# Altium footprint library Crystal_Osilator$.PcbLib: 54 footprints (part 1 of 4)
Each footprint in its own frame and in the unit in brackets; x right, y up, seen from the top. Pads: shape width x height; smd on the part's side, far side on the other; paste and mask are expansions set on the pad; w line width, h text height; cw(c..) or ccw(c..) is an arc to the next point about the centre after c.
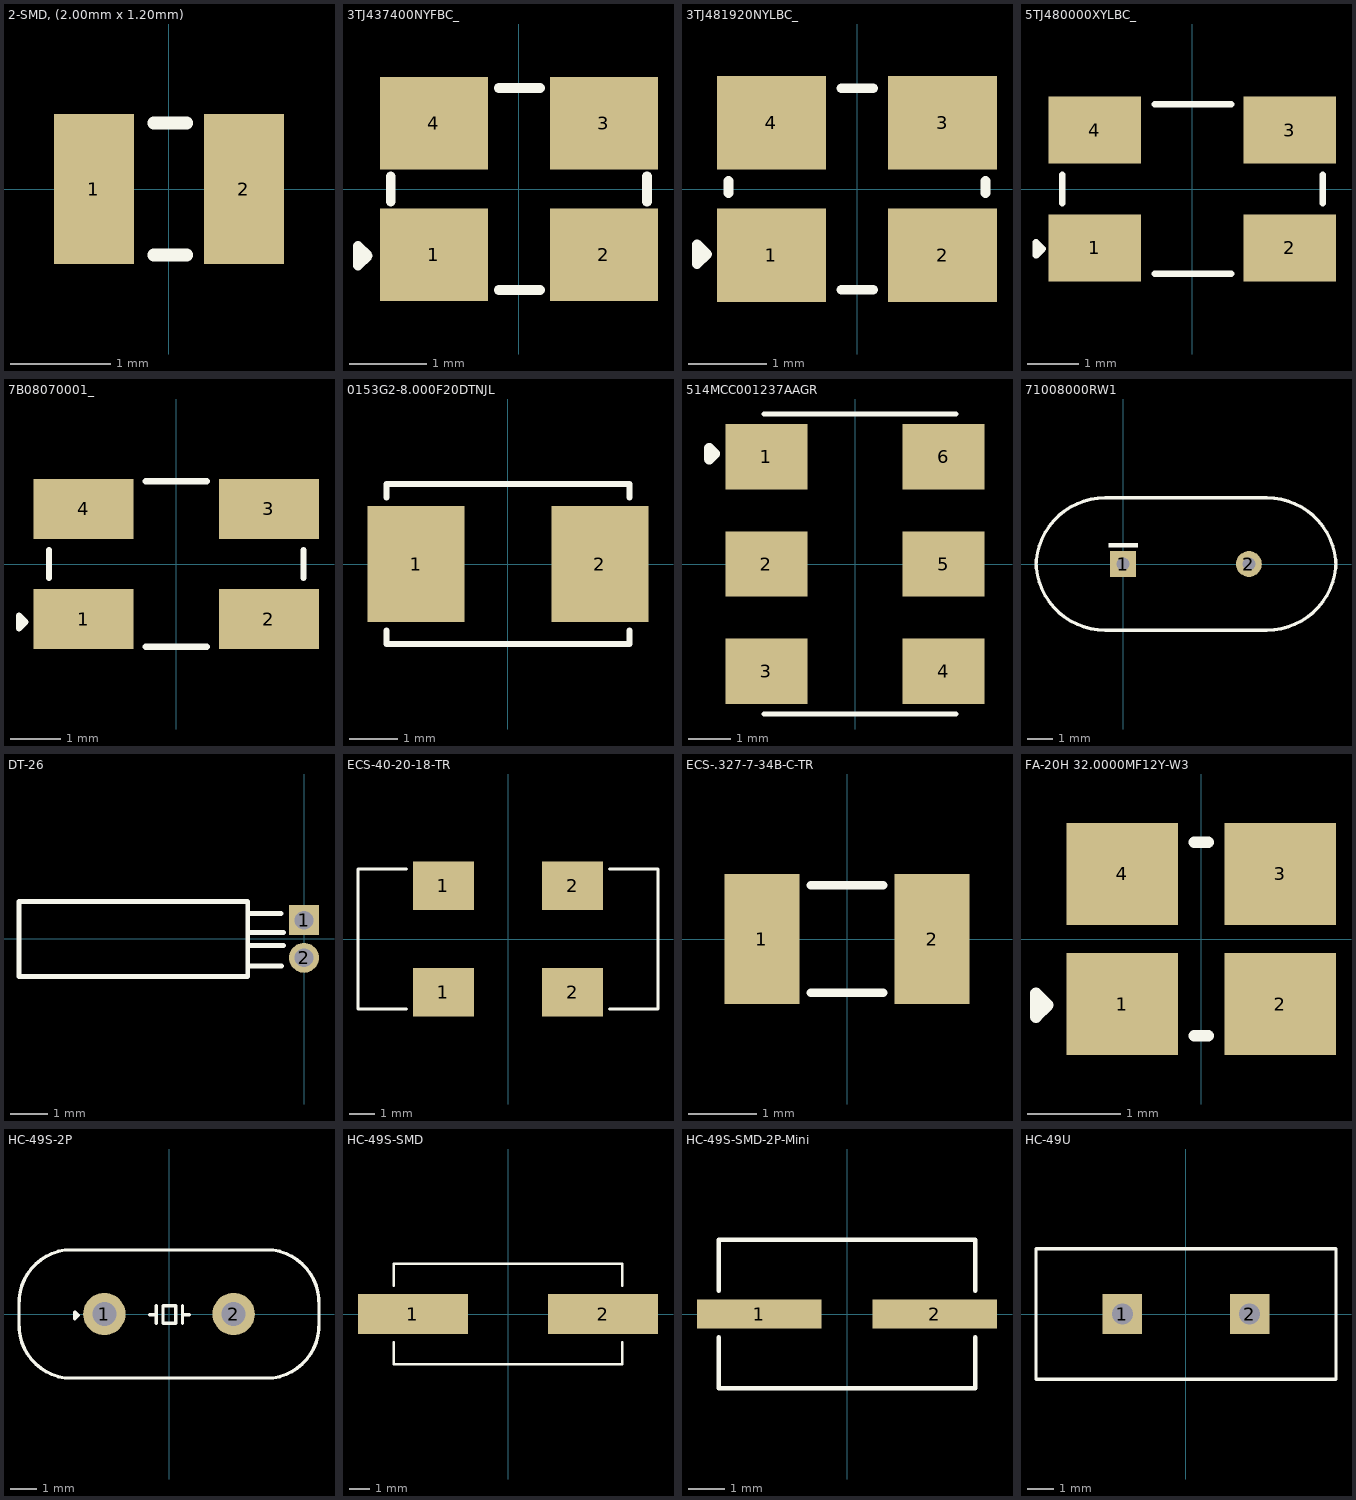
[diagram p0: the footprints below, top view; thin cyan lines are the x and y axes]

## 2-SMD, (2.00mm x 1.20mm) [mm]
pads (2):
  rect 0.8x1.5 smd: 1(-0.75,0) 2(0.75,0)
Top Overlay:
  lines w0.127: -0.152,-0.66 0.178,-0.66 ; -0.152,0.66 0.178,0.66
3D body "CM8V-T1A-32.768KHZ-6PF-20PPM-TA-QC.STEP": height 0.35, standoff 0, extent -1,-0.6 1,0.6

## 3TJ437400NYFBC_ [mm]
pads (4):
  rect 1.4x1.2 smd: 1(-1.1,-0.85) 2(1.1,-0.85) 3(1.1,0.85) 4(-1.1,0.85)
Top Overlay:
  lines w0.127: -1.659,-0.166 -1.659,0.164 ; -0.262,-1.307 0.272,-1.307 ; -0.262,1.307 0.272,1.307 ; 1.659,-0.166 1.659,0.164 ; -2.083,-0.991 -1.956,-0.864 -2.083,-0.737 -2.083,-0.991
3D body "User Library-Crystal_ECX-32.STEP": height 0.82, standoff 0, extent -1.6,-1.25 1.6,1.25

## 3TJ481920NYLBC_ [mm]
pads (4):
  rect 1.4x1.2 smd mask+0.07: 1(-1.1,-0.85) 2(1.1,-0.85) 3(1.1,0.85) 4(-1.1,0.85)
Top Overlay:
  lines w0.127: -1.651,-0.051 -1.651,0.102 ; -0.203,-1.295 0.203,-1.295 ; -0.203,1.295 0.203,1.295 ; 1.651,-0.051 1.651,0.102 ; -2.057,-0.965 -1.93,-0.838 -2.057,-0.711 -2.057,-0.965
3D body "User Library-XTAL-3_2x2_5.step": height 0.91, standoff -0.01, extent -1.6,-1.25 1.6,1.25

## 5TJ480000XYLBC_ [mm]
pads (4):
  rect 1.8x1.3 smd mask+0.07: 1(-1.9,-1.15) 2(1.9,-1.15) 3(1.9,1.15) 4(-1.9,1.15)
Top Overlay:
  lines w0.127: -2.54,-0.279 -2.54,0.279 ; -0.737,-1.651 0.762,-1.651 ; -0.737,1.651 0.762,1.651 ; 2.54,-0.279 2.54,0.279 ; -3.048,-1.295 -2.921,-1.168 -3.048,-1.041 -3.048,-1.295
3D body "User Library-CRYSTALSMD5X32.step": height 1, standoff 0, extent -2.5,-1.6 2.5,1.6

## 7B08070001_ [mm]
pads (4):
  rect 2x1.2 smd: 1(-1.85,-1.1) 2(1.85,-1.1) 3(1.85,1.1) 4(-1.85,1.1)
Top Overlay:
  lines w0.127: -2.54,-0.279 -2.54,0.279 ; -0.61,-1.651 0.61,-1.651 ; -0.61,1.651 0.61,1.651 ; 2.54,-0.279 2.54,0.279 ; -3.14,-1.285 -3.013,-1.158 -3.14,-1.031 -3.14,-1.285
3D body "User Library-Crystal.step": height 0.91, standoff -0.04, extent -2.475,-1.6 2.525,1.6

## 0153G2-8.000F20DTNJL [mm]
pads (2):
  rect 2x2.4 smd: 1(-1.9,0) 2(1.9,0)
Top Overlay:
  lines w0.127: -2.515,-1.372 -2.515,-1.651 2.515,-1.651 2.515,-1.372 ; -2.515,1.372 -2.515,1.651 2.515,1.651 2.515,1.372
3D body "NX5032GA 12MHZ AT-W.STEP": height 1.5, standoff 0, extent -2.5,-1.6 2.5,1.6

## 514MCC001237AAGR [mm]
pads (6):
  rect 1.95x1.55 smd: 1(-2.1,2.54) 2(-2.1,0) 3(-2.1,-2.54) 4(2.1,-2.54) 5(2.1,0) 6(2.1,2.54)
Top Overlay:
  lines w0.127: -2.159,-3.556 2.388,-3.556 ; -2.159,3.556 2.388,3.556
  lines w0.254: -3.454,2.489 -3.327,2.616 -3.454,2.743 -3.454,2.489
3D body "3D_PCB1_2025-11-04.step": height 1.3, standoff 0, extent -2.5,-3.5 2.5,3.5

## 71008000RW1 [mm]
pads (2):
  rect 1x1 hole 0.5: 1(0,0)
  round 1 hole 0.5: 2(4.88,0)
Top Overlay:
  rectangle: -0.559,0.635 0.584,0.813
  lines w0.127: -3.375,-0.114 cw(c-0.696,-0.114) -0.696,2.565 5.576,2.565 cw(c5.576,-0.114) 8.255,-0.114 ; -3.375,0.114 ccw(c-0.696,0.114) -0.696,-2.565 5.576,-2.565 ccw(c5.576,0.114) 8.255,0.114
3D body "71008000rw1.stp": height 3.85, standoff -13.03, extent -3.337,-2.5 8.163,2.5

## DT-26 [mm]
pads (2):
  rect 0.8x0.8 hole 0.5 paste+0 mask+0.051: 1(0,0.5)
  round 0.8 hole 0.5 paste+0 mask+0.051: 2(0,-0.5)
Top Overlay:
  lines w0.127: -1.5,-0.718 -0.592,-0.718 ; -1.5,-0.172 -0.539,-0.172 ; -1.5,0.171 -0.538,0.171 ; -1.5,0.679 -0.605,0.679 ; -7.6,-1 -7.6,1 -1.5,1 -1.5,-1 -7.6,-1
3D body "C93229.step": height 2.02, standoff -3.5, extent -7.511,-0.993 0.111,0.993

## ECS-40-20-18-TR [mm]
pads (4):
  rect 2.4x1.9 smd: 1(-2.54,-2.1) 1(-2.54,2.1) 2(2.54,-2.1) 2(2.54,2.1)
Top Overlay:
  lines w0.127: -4,-2.75 -5.9,-2.75 -5.9,2.75 -4,2.75 ; 4,-2.75 5.9,-2.75 5.9,2.75 4,2.75

## ECS-.327-7-34B-C-TR [mm] "CRYSTAL 32.7680KHZ 12.5PF SMD"
pads (2):
  rect 1.1x1.9 smd: 1(-1.25,0) 2(1.25,0)
Top Overlay:
  lines w0.127: -0.533,-0.787 0.533,-0.787 ; -0.533,0.787 0.533,0.787
3D body "ECS-.327-12.5-34B-C-TR--3DModel-STEP-40055.STEP": height 0.87, standoff -0.03, extent -1.6,-0.775 1.6,0.725

## FA-20H 32.0000MF12Y-W3 [mm]
pads (4):
  rect 1.2x1.1 smd: 1(-0.85,-0.7) 2(0.85,-0.7) 3(0.85,0.7) 4(-0.85,0.7)
Top Overlay:
  lines w0.127: -0.076,-1.041 0.076,-1.041 ; -0.076,1.041 0.076,1.041 ; -1.778,-0.838 -1.778,-0.584 -1.651,-0.711 -1.778,-0.838
3D body "step_temp.STEP": height 0.55, standoff 0, extent -1.25,-1 1.25,1

## HC-49S-2P [mm]
pads (2):
  round 1.6 hole 0.9: 1(-2.44,0) 2(2.44,0)
Top Overlay:
  lines w0.127: -0.737,-0.025 -0.483,-0.025 ; -0.483,-0.356 -0.483,0.305 ; 0.508,-0.356 0.508,0.305 ; 0.508,-0.025 0.762,-0.025 ; 3.912,2.413 -3.937,2.413 ccw(c-3.645,0.419) -5.658,0.33 -5.658,-0.33 ccw(c-3.645,-0.419) -3.937,-2.413 3.937,-2.413 ccw(c3.645,-0.419) 5.658,-0.33 5.658,0.33 ccw(c3.645,0.419) 3.937,2.413 ; -3.556,-0.178 -3.429,-0.051 -3.556,0.076 -3.556,-0.178 ; -0.229,-0.356 -0.229,0.305 0.254,0.305 0.254,-0.356 -0.229,-0.356
3D body "User Library-HP49US.step": height 3.7, standoff -3.8, extent -5.7,-2.288 5.65,2.362

## HC-49S-SMD [mm]
pads (2):
  rect 5.5x2 smd: 1(-4.75,0) 2(4.75,0)
Top Overlay:
  lines w0.127: -5.715,-1.422 -5.715,-2.515 5.715,-2.515 5.715,-1.422 ; -5.715,1.422 -5.715,2.515 5.715,2.515 5.715,1.422
3D body "User Library-HC49S-SMD.step": height 4.4, standoff 0, extent -6.7,-2.45 6.7,2.45

## HC-49S-SMD-2P-Mini [mm]
pads (2):
  rect 3.4x0.8 smd: 1(-2.4,0) 2(2.4,0)
Top Overlay:
  lines w0.127: -3.505,-0.635 -3.505,-2.032 3.505,-2.032 3.505,-0.635 ; -3.505,0.635 -3.505,2.032 3.505,2.032 3.505,0.635
3D body "13.560M 20PF 10PPM.STEP": height 2.35, standoff 0, extent -3.9,-2 3.9,2

## HC-49U [mm]
pads (2):
  rect 1.524x1.524 hole 0.8: 1(-2.44,0) 2(2.44,0)
Top Overlay:
  lines w0.127: -5.75,-2.5 5.75,-2.5 5.75,2.5 -5.75,2.5 -5.75,-2.5
3D body "HC49U.stp": height 13.46, standoff -2.7, extent -5.516,-2.325 5.516,2.325